# Altium footprint library Thunderscope_Rev5.3.PcbLib: 68 footprints (part 4 of 5)
Each footprint in its own frame and in the unit in brackets; x right, y up, seen from the top. Pads: shape width x height; smd on the part's side, far side on the other; paste and mask are expansions set on the pad; w line width, h text height; cw(c..) or ccw(c..) is an arc to the next point about the centre after c.
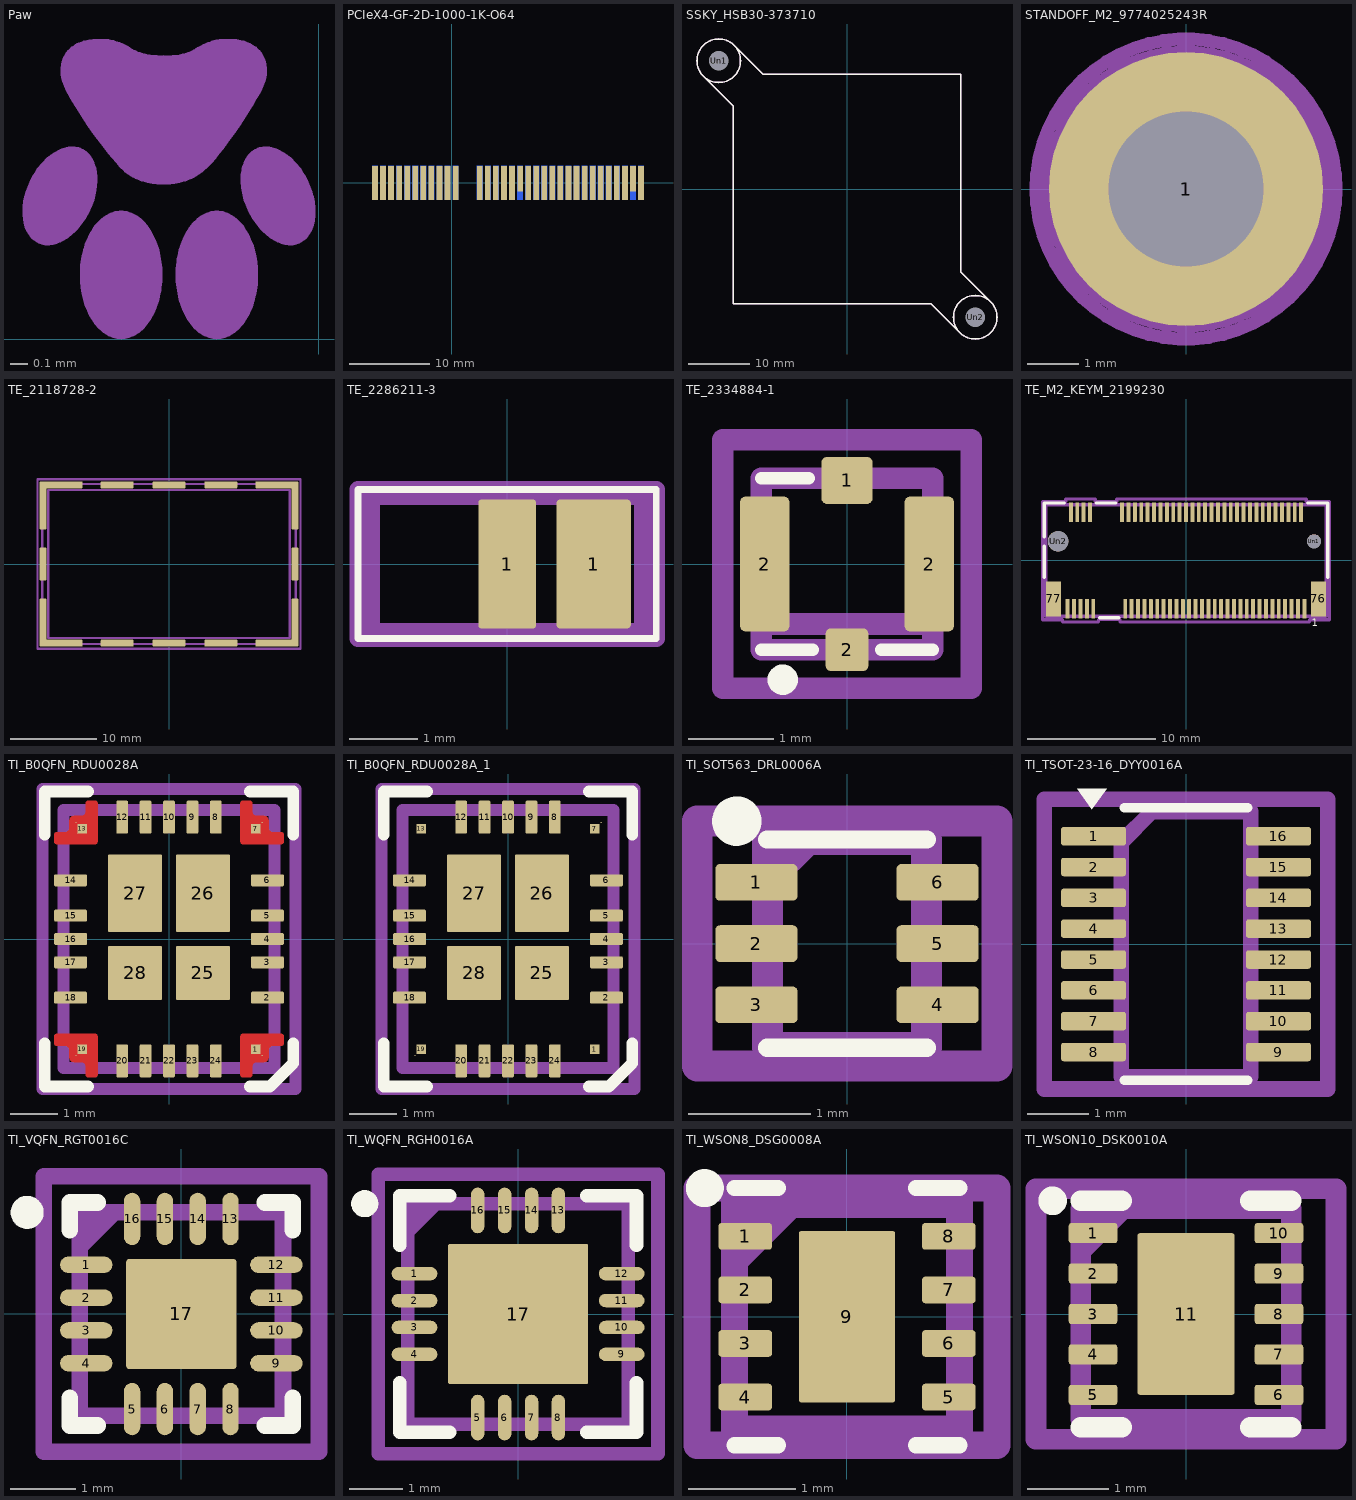
[diagram p3: the footprints below, top view; thin cyan lines are the x and y axes]

## Paw [mm]
Top Solder:
  drawing of 5 lines, arcs and shapes, not listed

## PCIeX4-GF-2D-1000-1K-O64 [mm]
pads (64):
  rect 0.7x3.2 smd far side paste-3.2 mask+0: A1(-9.5,0.5)
  rect 0.7x4.2 smd far side paste-4.2 mask+0: A2(-8.5,0) A3(-7.5,0) A4(-6.5,0) A5(-5.5,0) A6(-4.5,0) A7(-3.5,0) A8(-2.5,0) A9(-1.5,0) A10(-0.5,0) A11(0.5,0) A12(3.5,0) A13(4.5,0) A14(5.5,0) A15(6.5,0) A16(7.5,0) A17(8.5,0) A18(9.5,0) A19(10.5,0) A20(11.5,0) A21(12.5,0) A22(13.5,0) A23(14.5,0) A24(15.5,0) A25(16.5,0) A26(17.5,0) A27(18.5,0) A28(19.5,0) A29(20.5,0) A30(21.5,0) A31(22.5,0) A32(23.5,0)
  rect 0.7x4.2 smd paste-4.2 mask+0: B1(-9.5,0) B2(-8.5,0) B3(-7.5,0) B4(-6.5,0) B5(-5.5,0) B6(-4.5,0) B7(-3.5,0) B8(-2.5,0) B9(-1.5,0) B10(-0.5,0) B11(0.5,0) B12(3.5,0) B13(4.5,0) B14(5.5,0) B15(6.5,0) B16(7.5,0) B18(9.5,0) B19(10.5,0) B20(11.5,0) B21(12.5,0) B22(13.5,0) B23(14.5,0) B24(15.5,0) B25(16.5,0) B26(17.5,0) B27(18.5,0) B28(19.5,0) B29(20.5,0) B30(21.5,0) B32(23.5,0)
  rect 0.7x3.2 smd paste-3.2 mask+0: B17(8.5,0.5) B31(22.5,0.5)
Top Solder:
  lines w0.025: -10.4,-3.75 24.4,-3.75 24.4,2.225 -10.4,2.225 -10.4,-3.75
Bottom Solder:
  lines w0.025: -10.4,-3.75 24.4,-3.75 24.4,2.225 -10.4,2.225 -10.4,-3.75

## SSKY_HSB30-373710 [mm]
pads (2):
  round 3.1 hole 3.1 mask+0: Un1(-20.86,20.86) Un2(20.86,-20.86)
Top Overlay:
  circle w0.254: c-20.86,20.86 r3.54
  circle w0.254: c20.86,-20.86 r3.54
  lines w0.254: -23.486,18.486 -18.5,13.5 -18.5,-18.7 13.7,-18.7 18.486,-23.486 ; -18.486,23.486 -13.7,18.7 18.5,18.7 18.5,-13.5 23.486,-18.486
Mechanical 6:
  circle w0.254: c-20.86,20.86 r3.54
  circle w0.254: c20.86,-20.86 r3.54
  lines w0.254: -23.486,18.486 -18.5,13.5 -18.5,-18.7 13.7,-18.7 18.486,-23.486 ; -18.486,23.486 -13.7,18.7 18.5,18.7 18.5,-13.5 23.486,-18.486
  text "'.Designator'" at 2.431,0.717 h2

## STANDOFF_M2_9774025243R [mm]
pads (1):
  round 5.3 / inner round 3.5 / far side round 3.5 hole 3 mask+0: 1(0,0)
Top Paste:
  region: 0.3,1.52 0.6,1.429 0.86,1.289 1.096,1.096 1.29,0.859 1.43,0.596 1.52,0.3 2.542,0.3 2.503,0.536 2.439,0.776 2.356,1.002 2.248,1.224 2.121,1.433 1.974,1.63 1.81,1.81 1.635,1.97 1.433,2.122 1.221,2.25 1.007,2.354 0.778,2.439 0.543,2.502 0.3,2.542
  region: 1.429,-0.6 1.289,-0.86 1.096,-1.096 0.859,-1.29 0.596,-1.43 0.3,-1.52 0.3,-2.542 0.536,-2.503 0.776,-2.439 1.002,-2.356 1.224,-2.248 1.433,-2.121 1.63,-1.974 1.81,-1.81 1.97,-1.635 2.122,-1.433 2.25,-1.221 2.354,-1.007 2.439,-0.778 2.502,-0.543 2.542,-0.3 1.52,-0.3
  region: -0.536,2.503 -0.776,2.439 -1.002,2.356 -1.224,2.248 -1.433,2.121 -1.63,1.974 -1.81,1.81 -1.97,1.635 -2.122,1.433 -2.25,1.221 -2.354,1.007 -2.439,0.778 -2.502,0.543 -2.542,0.3 -1.52,0.3 -1.429,0.6 -1.289,0.86 -1.096,1.096 -0.859,1.29 -0.596,1.43 -0.3,1.52 -0.3,2.542
  region: -2.503,-0.536 -2.439,-0.776 -2.356,-1.002 -2.248,-1.224 -2.121,-1.433 -1.974,-1.63 -1.81,-1.81 -1.635,-1.97 -1.433,-2.122 -1.221,-2.25 -1.007,-2.354 -0.778,-2.439 -0.543,-2.502 -0.3,-2.542 -0.3,-1.52 -0.6,-1.429 -0.86,-1.289 -1.096,-1.096 -1.29,-0.859 -1.43,-0.596 -1.52,-0.3 -2.542,-0.3
  lines w0.254: -2.542,-0.3 -1.52,-0.3 ; -2.542,0.3 -1.52,0.3 ; -0.3,1.52 -0.3,2.542 ; 0.3,1.52 0.3,2.542
Mechanical 4:
  circle w0.254: c0,0 r2.9
Mechanical 7:
  circle w0.254: c0,0 r2.65
  text "'.Designator'" at 0.322,0.228 h0.8

## TE_2118728-2 [mm]
pads (16):
  rrect25% 0.8x5.55 smd mask+0: 1(-14.581,6.772) 1(-14.579,-6.772) 1(14.579,6.772) 1(14.581,-6.772)
  rrect25% 0.8x3.8 smd mask+0: 1(-14.579,0.003) 1(14.581,0.003)
  rrect25% 4.98x0.8 smd mask+0: 1(-12.491,9.147) 1(-12.489,-9.147) 1(12.489,9.147) 1(12.491,-9.147)
  rrect25% 3.8x0.8 smd mask+0: 1(-6.001,9.147) 1(-5.999,-9.147) 1(-0.001,9.147) 1(0.001,-9.147) 1(5.999,9.147) 1(6.001,-9.147)
Mechanical 5:
  lines w0.254: -15.2,-9.8 15.2,-9.8 15.2,9.8 -15.2,9.8 -15.2,-9.8 ; -13.975,-8.55 13.975,-8.55 13.975,8.55 -13.975,8.55 -13.975,-8.55
Mechanical 6:
  lines w0.254: -14.675,-9.25 14.675,-9.25 14.675,9.25 -14.675,9.25 -14.675,-9.25
  text "'.Designator'" at 1.487,-9.868 h1
3D body "c-2118728-2-a-3d.step": height 7.01, standoff 0.01, extent -14.68,-9.25 14.68,9.25

## TE_2286211-3 [mm]
pads (2):
  rrect10% 0.85x1.9 smd mask+0: 1(0,0)
  rrect10% 1.1x1.9 smd mask+0: 1(1.275,0)
Top Overlay:
  lines w0.1: -2.2,-1.1 2.2,-1.1 2.2,1.1 -2.2,1.1 -2.2,-1.1
Mechanical 5:
  lines w0.254: -2.2,-1.1 2.2,-1.1 2.2,1.1 -2.2,1.1 -2.2,-1.1
Mechanical 6:
  lines w0.254: -2,-1 -2,1 2,1 2,-1 -2,-1
  text "'.Designator'" at 0.264,0.14 h0.5
3D body "2286211-3.step": height 2.41, standoff 0.01, extent -1.873,-0.85 2.127,0.85

## TE_2334884-1 [mm]
pads (4):
  rrect25% 0.6x0.55 smd mask+0: 1(0,0.975)
  rrect25% 0.58x1.58 smd mask+0: 2(-0.96,0) 2(0.96,0)
  rrect25% 0.5x0.5 smd mask+0: 2(0,-1)
Top Overlay:
  circle w0.254: c-0.75,-1.35 r0.05
  lines w0.15: -1,-1 -0.4,-1 ; -1,1 -0.45,1 ; 0.4,-1 1,-1
Mechanical 4:
  lines w0.254: -1.45,-1.45 -1.45,1.45 1.45,1.45 1.45,-1.45 -1.45,-1.45
Mechanical 7:
  lines w0.254: -1,-1 1,-1 ; -1,-1 -1,1 1,1 1,-1 ; -1,-1 -1,-0.7 1,-0.7 1,-1 ; -1,-1 1,-1
  text "'.Designator'" at 0.138,0.091 h0.25
3D body "c-2334884-1-a2-3d.step": height 0.61, standoff 0.01, extent -1,-1 1,1

## TE_M2_KEYM_2199230 [mil]
pads (71):
  rrect25% 12x61 smd paste+0 mask+0: 1(364.17,-148.62) 2(354.33,148.62) 3(344.49,-148.62) 4(334.65,148.62) 5(324.8,-148.62) 6(314.96,148.62) 7(305.12,-148.62) 8(295.28,148.62) 9(285.43,-148.62) 10(275.59,148.62) 11(265.75,-148.62) 12(255.91,148.62) 13(246.06,-148.62) 14(236.22,148.62) 15(226.38,-148.62) 16(216.54,148.62) 17(206.69,-148.62) 18(196.85,148.62) 19(187.01,-148.62) 20(177.17,148.62) 21(167.32,-148.62) 22(157.48,148.62) 23(147.64,-148.62) 24(137.8,148.62) 25(127.95,-148.62) 26(118.11,148.62) 27(108.27,-148.62) 28(98.43,148.62) 29(88.58,-148.62) 30(78.74,148.62) 31(68.9,-148.62) 32(59.06,148.62) 33(49.21,-148.62) 34(39.37,148.62) 35(29.53,-148.62) 36(19.68,148.62) 37(9.84,-148.62) 38(0,148.62) 39(-9.84,-148.62) 40(-19.68,148.62) 41(-29.53,-148.62) 42(-39.37,148.62) 43(-49.21,-148.62) 44(-59.06,148.62) 45(-68.9,-148.62) 46(-78.74,148.62) 47(-88.58,-148.62) 48(-98.43,148.62) 49(-108.27,-148.62) 50(-118.11,148.62) 51(-127.95,-148.62) 52(-137.8,148.62) 53(-147.64,-148.62) 54(-157.48,148.62) 55(-167.32,-148.62) 56(-177.17,148.62) 57(-187.01,-148.62) 58(-196.85,148.62) 67(-285.43,-148.62) 68(-295.28,148.62) 69(-305.12,-148.62) 70(-314.96,148.62) 71(-324.8,-148.62) 72(-334.65,148.62) 73(-344.49,-148.62) 74(-354.33,148.62) 75(-364.17,-148.62)
  rrect10% 47x108 smd mask+0: 76(407.48,-118.11) 77(-407.48,-118.11)
  round 43 hole 43 mask+0: Un1(393.7,59.06)
  round 63 hole 63 mask+0: Un2(-393.7,59.06)
Top Overlay:
  lines w10: -436,-52.01 -436,44.91 ; -436,73.19 -436,176.5 -373.43,176.5 ; -276.18,176.5 -215.95,176.5 ; -266.33,-176.5 -206.11,-176.5 ; 373.43,176.5 436,176.5 436,-52.01
  text "1" at 386.81,-210.7 h39.37
Mechanical 4:
  lines w10: -440.98,-54.11 -440.98,-182.11 -380.17,-182.11 -380.17,-189.12 -269.43,-189.12 -269.43,-181.5 -203.01,-181.5 -203.01,-189.12 380.17,-189.12 380.17,-182.11 440.98,-182.11 441,-54.11 ; -440.98,-54.11 -441,181.5 -370.33,181.5 -370.33,189.12 -279.28,189.12 -279.28,181.5 -212.85,181.5 -212.85,189.12 370.33,189.12 370.33,181.5 441,181.5 441,-54.11 ; -441,-54.11 -440.98,-54.11 ; 440.98,-54.11 441,-54.11
Mechanical 7:
  lines w10: -440.98,-54.11 -440.98,-182.11 -380.17,-182.11 -380.17,-189.12 -269.43,-189.12 -269.43,-181.5 -203.01,-181.5 -203.01,-189.12 380.17,-189.12 380.17,-182.11 440.98,-182.11 440.98,-54.11 ; -441,-54.11 -440.98,-54.11 ; -441,-54.11 -441,181.5 -370.33,181.5 -370.33,189.12 -279.28,189.12 -279.28,181.5 -212.85,181.5 -212.85,189.12 370.33,189.12 370.33,181.5 441,181.5 441,-54.11 ; 440.98,-54.11 441,-54.11 ; -431,-171.5 431,-171.5 431,171.5 -431,171.5 -431,-171.5
  text "1" at 341.6,-256.19 h39.37
  text "'.Designator'" at -13.9,-21.47 h59.06
3D body "c-1-2199230-5-b3-3d.step": height 161.92, standoff -23.12, extent -431.1,-170 431.1,172.52

## TI_B0QFN_RDU0028A [mm]
pads (36):
  rect 0.2x0.2 smd mask+0: 1(1.85,-2.35) 7(1.85,2.35) 13(-1.85,2.35) 19(-1.85,-2.35)
  round 0.025 smd mask+0.102: 1(1.987,-2.488) 7(1.987,2.487) 13(-1.987,2.487) 19(-1.987,-2.488)
  round 0.025 smd mask+0: 1(1.987,-2.488) 7(1.987,2.487) 13(-1.987,2.487) 19(-1.987,-2.488)
  rrect20% 0.7x0.25 smd mask+0: 2(2.1,-1.25) 3(2.1,-0.5) 4(2.1,0) 5(2.1,0.5) 6(2.1,1.25) 14(-2.1,1.25) 15(-2.1,0.5) 16(-2.1,0) 17(-2.1,-0.5) 18(-2.1,-1.25)
  rrect20% 0.25x0.7 smd mask+0: 8(1,2.6) 9(0.5,2.6) 10(0,2.6) 11(-0.5,2.6) 12(-1,2.6) 20(-1,-2.6) 21(-0.5,-2.6) 22(0,-2.6) 23(0.5,-2.6) 24(1,-2.6)
  rrect4% 1.15x1.15 smd paste-0.035 mask+0: 25(0.725,-0.725) 28(-0.725,-0.725)
  rrect4% 1.15x1.65 smd paste-0.045 mask+0: 26(0.725,0.975) 27(-0.725,0.975)
Top Layer:
  region: 235 vertices and 0 holes, not listed, extent -2.45,2.025 -1.525,2.95
  region: 235 vertices and 0 holes, not listed, extent 1.525,2.025 2.45,2.95
  region: 235 vertices and 0 holes, not listed, extent -2.45,-2.95 -1.525,-2.025
  region: 235 vertices and 0 holes, not listed, extent 1.525,-2.95 2.45,-2.025
Top Overlay:
  lines w0.254: -2.65,-2.225 -2.65,-3.15 -1.725,-3.15 ; -2.65,2.225 -2.65,3.15 -1.725,3.15 ; 1.725,-3.15 2.15,-3.15 2.65,-2.65 2.65,-2.225 ; 1.725,3.15 2.65,3.15 2.65,2.225
Mechanical 4:
  lines w0.254: -2.7,-3.2 2.7,-3.2 2.7,3.2 -2.7,3.2 -2.7,-3.2
Mechanical 7:
  lines w0.254: -2.25,-2.75 2.25,-2.75 2.25,2.75 -2.25,2.75 -2.25,-2.75
  text "'.Designator'" at -0.281,0.391 h1
3D body "TPSM82913RDUR.step": height 1.9, standoff 0, extent -2.25,-2.75 2.25,2.75

## TI_B0QFN_RDU0028A_1 [mm]
pads (30):
  rect 0.2x0.2 smd mask+0: 1(1.85,-2.35) 7(1.85,2.35) 13(-1.85,2.35) 19(-1.85,-2.35)
  rrect20% 0.7x0.25 smd mask+0: 2(2.1,-1.25) 3(2.1,-0.5) 4(2.1,0) 5(2.1,0.5) 6(2.1,1.25) 14(-2.1,1.25) 15(-2.1,0.5) 16(-2.1,0) 17(-2.1,-0.5) 18(-2.1,-1.25)
  round 0.025 smd mask+0.102: 7(1.987,2.487) 19(-1.987,-2.488)
  rrect20% 0.25x0.7 smd mask+0: 8(1,2.6) 9(0.5,2.6) 10(0,2.6) 11(-0.5,2.6) 12(-1,2.6) 20(-1,-2.6) 21(-0.5,-2.6) 22(0,-2.6) 23(0.5,-2.6) 24(1,-2.6)
  rrect4% 1.15x1.15 smd paste-0.035 mask+0: 25(0.725,-0.725) 28(-0.725,-0.725)
  rrect4% 1.15x1.65 smd paste-0.045 mask+0: 26(0.725,0.975) 27(-0.725,0.975)
Top Overlay:
  lines w0.254: -2.65,-2.225 -2.65,-3.15 -1.725,-3.15 ; -2.65,2.225 -2.65,3.15 -1.725,3.15 ; 1.725,-3.15 2.15,-3.15 2.65,-2.65 2.65,-2.225 ; 1.725,3.15 2.65,3.15 2.65,2.225
Mechanical 4:
  lines w0.254: -2.7,-3.2 -2.7,3.2 2.7,3.2 2.7,-3.2 -2.7,-3.2
Mechanical 7:
  lines w0.254: -2.25,-2.75 -2.25,2.75 2.25,2.75 2.25,-2.75 -2.25,-2.75
  text "'.Designator'" at -0.281,0.391 h1

## TI_SOT563_DRL0006A [mm]
pads (6):
  rrect25% 0.67x0.3 smd mask+0: 1(-0.74,0.5) 2(-0.74,0) 3(-0.74,-0.5) 4(0.74,-0.5) 5(0.74,0) 6(0.74,0.5)
Top Overlay:
  circle w0.254: c-0.9,1 r0.075
  lines w0.15: -0.65,-0.85 0.65,-0.85 ; -0.65,0.85 0.65,0.85
Mechanical 5:
  lines w0.254: -1.225,-1 -1.225,1 1.225,1 1.225,-1 -1.225,-1
Mechanical 6:
  region: -0.65,0.35 -0.65,0.85 -0.15,0.85
  lines w0.254: -0.65,-0.85 0.65,-0.85 0.65,0.85 -0.65,0.85 -0.65,-0.85
  text "'.Designator'" at -0.071,0.108 h0.25
3D body "TI_SOT563_DRL0006A.step": height 0.6, standoff 0, extent -0.8,-0.848 0.8,0.848

## TI_TSOT-23-16_DYY0016A [mm]
pads (16):
  rrect25% 1.05x0.3 smd mask+0: 1(-1.5,1.75) 2(-1.5,1.25) 3(-1.5,0.75) 4(-1.5,0.25) 5(-1.5,-0.25) 6(-1.5,-0.75) 7(-1.5,-1.25) 8(-1.5,-1.75) 9(1.5,-1.75) 10(1.5,-1.25) 11(1.5,-0.75) 12(1.5,-0.25) 13(1.5,0.25) 14(1.5,0.75) 15(1.5,1.25) 16(1.5,1.75)
Top Overlay:
  region: -1.525,2.185 -1.765,2.515 -1.285,2.515
  lines w0.15: -1,-2.21 0,-2.21 1,-2.21 ; -1,2.21 0,2.21 1,2.21
Mechanical 5:
  lines w0.254: -2.3,-2.35 2.3,-2.35 2.3,2.35 -2.3,2.35 -2.3,-2.35
Mechanical 6:
  lines w0.254: -1.05,-2.15 1.05,-2.15 1.05,2.15 -0.55,2.15 -1.05,1.65 -1.05,-2.15
  text "'.Designator'" at 0.166,-0.541 h0.5
3D body "DYY0016A.step": height 1.02, standoff 0, extent -1.632,-2.1 1.632,2.1

## TI_VQFN_RGT0016C [mm]
pads (17):
  rrect100% 0.8x0.25 smd mask+0: 1(-1.45,0.75) 2(-1.45,0.25) 3(-1.45,-0.25) 4(-1.45,-0.75) 9(1.45,-0.75) 10(1.45,-0.25) 11(1.45,0.25) 12(1.45,0.75)
  rrect100% 0.25x0.8 smd mask+0: 5(-0.75,-1.45) 6(-0.25,-1.45) 7(0.25,-1.45) 8(0.75,-1.45) 13(0.75,1.45) 14(0.25,1.45) 15(-0.25,1.45) 16(-0.75,1.45)
  rrect5% 1.68x1.68 smd paste-0.1 mask+0: 17(0,0)
Top Overlay:
  circle w0.254: c-2.35,1.55 r0.125
  lines w0.254: -1.7,-1.275 -1.7,-1.7 -1.275,-1.7 ; -1.7,1.275 -1.7,1.7 -1.275,1.7 ; 1.275,-1.7 1.7,-1.7 1.7,-1.275 ; 1.275,1.7 1.7,1.7 1.7,1.275
Mechanical 5:
  lines w0.254: -2.1,-2.1 -2.1,2.1 2.1,2.1 2.1,-2.1 -2.1,-2.1
Mechanical 6:
  region: -1.55,0.85 -1.55,1.55 -0.85,1.55
  lines w0.254: -1.55,-1.55 1.55,-1.55 1.55,1.55 -1.55,1.55 -1.55,-1.55
  text "'.Designator'" at -0.436,-0.133 h0.4
3D body "TI_VQFN_RGT0016C.step": height 1, standoff 0, extent -1.551,-1.551 1.551,1.551

## TI_WQFN_RGH0016A [mm]
pads (17):
  rrect100% 0.85x0.25 smd mask+0: 1(-1.925,0.75) 2(-1.925,0.25) 3(-1.925,-0.25) 4(-1.925,-0.75) 9(1.925,-0.75) 10(1.925,-0.25) 11(1.925,0.25) 12(1.925,0.75)
  rrect100% 0.25x0.85 smd mask+0: 5(-0.75,-1.925) 6(-0.25,-1.925) 7(0.25,-1.925) 8(0.75,-1.925) 13(0.75,1.925) 14(0.25,1.925) 15(-0.25,1.925) 16(-0.75,1.925)
  rrect2% 2.6x2.6 smd paste-1.3 mask+0: 17(0,0)
Top Overlay:
  circle w0.254: c-2.85,2.05 r0.125
  lines w0.254: -2.2,-1.275 -2.2,-2.2 -1.275,-2.2 ; -2.2,1.275 -2.2,2.2 -1.275,2.2 ; 1.275,-2.2 2.2,-2.2 2.2,-1.275 ; 1.275,2.2 2.2,2.2 2.2,1.275
Top Paste:
  lines w0.254: -1.25,-1.25 -0.1,-1.25 -0.1,-0.1 -1.25,-0.1 -1.25,-1.25 ; -1.25,0.1 -0.1,0.1 -0.1,1.25 -1.25,1.25 -1.25,0.1 ; 0.1,-1.25 1.25,-1.25 1.25,-0.1 0.1,-0.1 0.1,-1.25 ; 0.1,0.1 1.25,0.1 1.25,1.25 0.1,1.25 0.1,0.1
Mechanical 5:
  lines w0.254: -2.6,-2.6 -2.6,2.6 2.6,2.6 2.6,-2.6 -2.6,-2.6
Mechanical 6:
  region: -2.05,1.35 -2.05,2.05 -1.35,2.05
  lines w0.254: -2.05,-2.05 2.05,-2.05 2.05,2.05 -2.05,2.05 -2.05,-2.05
  text "'.Designator'" at 0.166,-0.547 h0.5
3D body "TI_WQFN_RGH0016A.step": height 0.8, standoff 0, extent -2.051,-2.051 2.051,2.051

## TI_WSON8_DSG0008A [mm]
pads (9):
  rrect25% 0.5x0.25 smd mask+0: 1(-0.95,0.75) 2(-0.95,0.25) 3(-0.95,-0.25) 4(-0.95,-0.75) 5(0.95,-0.75) 6(0.95,-0.25) 7(0.95,0.25) 8(0.95,0.75)
  rrect5% 0.9x1.6 smd paste-0.9 mask+0: 9(0,0)
Top Overlay:
  circle w0.254: c-1.327,1.2 r0.05
  lines w0.15: -1.05,-1.2 -0.645,-1.2 ; -1.05,1.2 -0.645,1.2 ; 0.645,-1.2 1.05,-1.2 ; 0.645,1.2 1.05,1.2
Top Paste:
  region: 0.45,-0.8 -0.45,-0.8 -0.45,-0.1 0.45,-0.1
  region: 0.45,0.1 -0.45,0.1 -0.45,0.8 0.45,0.8
Mechanical 5:
  lines w0.254: -1.4,-1.2 -1.4,1.2 1.4,1.2 1.4,-1.2 -1.4,-1.2
Mechanical 6:
  region: -1.05,0.35 -1.05,1.05 -0.35,1.05
  lines w0.254: -1.05,-1.05 1.05,-1.05 1.05,1.05 -1.05,1.05 -1.05,-1.05
  text "'.Designator'" at 0.086,-0.126 h0.3
3D body "SON127P600-8N.step": height 0.8, standoff 0, extent -1.051,-1.05 1.051,1.05

## TI_WSON10_DSK0010A [mm]
pads (11):
  rrect25% 0.6x0.25 smd mask+0: 1(-1.15,1) 2(-1.15,0.5) 3(-1.15,0) 4(-1.15,-0.5) 5(-1.15,-1) 6(1.15,-1) 7(1.15,-0.5) 8(1.15,0) 9(1.15,0.5) 10(1.15,1)
  rrect5% 1.2x2 smd paste-2 mask+0: 11(0,0)
Top Overlay:
  circle w0.254: c-1.65,1.4 r0.05
  lines w0.254: -1.3,-1.4 -0.795,-1.4 ; -1.3,1.4 -0.795,1.4 ; 0.795,-1.4 1.3,-1.4 ; 0.795,1.4 1.3,1.4
Top Paste:
  lines w0.254: -0.565,-0.995 0.565,-0.995 0.565,-0.105 -0.565,-0.105 -0.565,-0.995 ; -0.565,0.105 0.565,0.105 0.565,0.995 -0.565,0.995 -0.565,0.105
Mechanical 5:
  lines w0.254: -1.855,-1.55 -1.855,1.55 1.855,1.55 1.855,-1.55 -1.855,-1.55
Mechanical 6:
  region: -1.3,0.6 -1.3,1.3 -0.6,1.3
  lines w0.254: -1.3,-1.3 -1.3,1.3 1.3,1.3 1.3,-1.3 -1.3,-1.3
  text "'.Designator'" at 0.085,-0.13 h0.3
3D body "TI_WSON10_DSK0010A.step": height 0.8, standoff 0, extent -1.301,-1.3 1.301,1.3